# Altium schematic symbol library TitansLib.SchLib: 462 symbols (part 7 of 24)
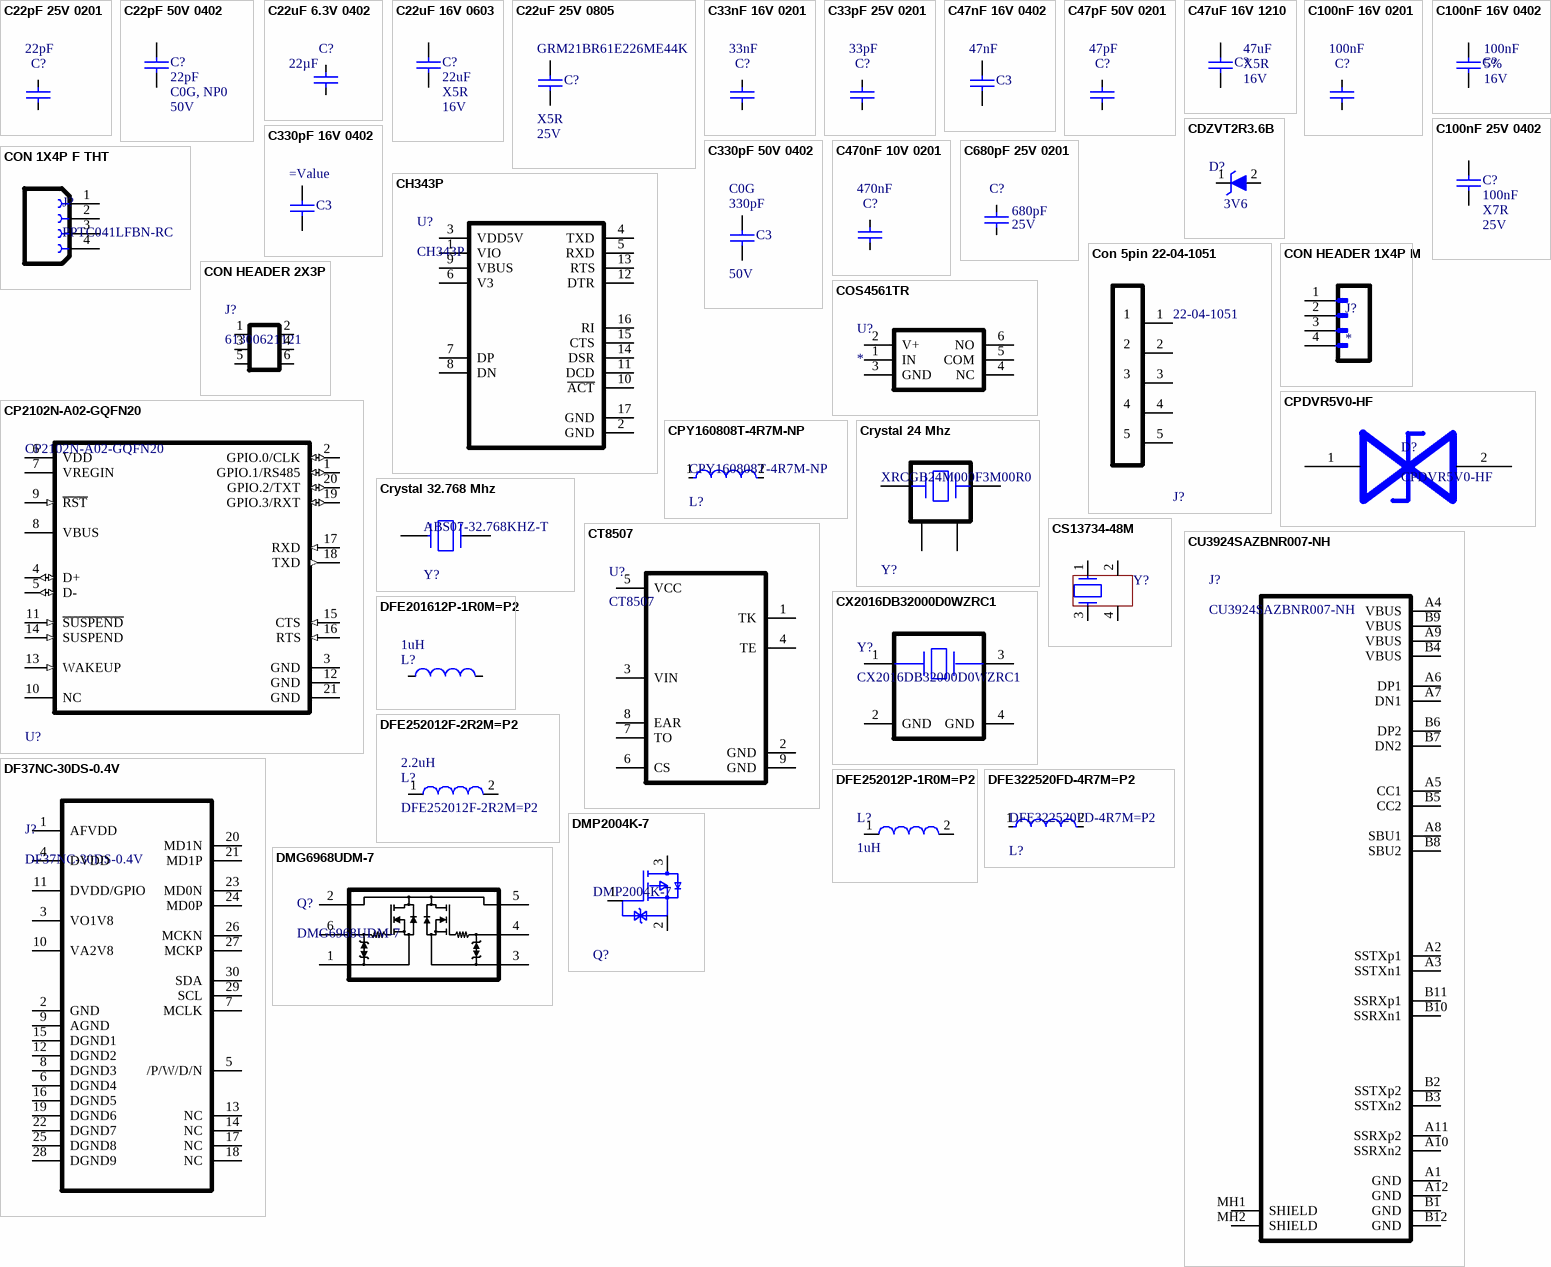
[diagram p23: symbols C22pF 25V 0201 to DMP2004K-7]

## C22pF 25V 0201
designator C?, comment value 22pF  (hidden comment: GRM0335C1E220JA01D)
25V 22pF C0G ±5% 0201 Multilayer Ceramic Capacitors MLCC - SMD/SMT ROHS; Manufacturer: Murata; Manufacturer Lifecycle Status: IN PRODUCTION; Temperature Coefficient: 30ppm/°C; Supplier: DigiKey; Supplier Part Number: 490-1253-1-ND; Manufacturer Part Number: GRM0335C1E220JA01D; RoHS: Compliant; Category: Ceramic Capacitors; Stock: 779005; Pricing: 1=0.1, 10=0.013, 50=0.0086, 100=0.0072, 500=0.00494, 1000=0.00424, 2500=0.00351, 5000=0.00308 (USD); Case/Package: 0201; Case Code (Imperial): 0201; Case Code (Metric): 0603; Country of Origin: Japan, Mainland China, Philippines, Singapore, Thailand; Depth: 300µm; Dielectric: C0G; Dielectric Material: Ceramic; Export Control Classification Number (ECCN) Code: EAR99; Height: 300µm; Harmonized Tariff Schedule (HTS) Code: 8532.24.00.20; Introduction Date: 2013-05-17; Lead Free: Lead Free; Length: 600µm; Lifecycle Status: Production; Material: Ceramic; Max Operating Temperature: 125°C; Min Operating Temperature: -55°C; Mounting Technology: Surface Mount; Number of Terminals: 2; Packaging: Cut Tape; Radiation Hardening: No; REACH SVHC: Yes; Schedule B: 8532240020, 8532240020|8532240020, 8532240020|8532240020|8532240020, 8532240020|8532240020|8532240020|8532240020; Termination: SMD/SMT; Thickness: 300µm; Tolerance: 5%; Voltage: 25V; Voltage Rating: 25V; Voltage Rating (DC): 25V; Width: 300µm; ComponentLink1URL: https://datasheet.octopart.com:443/GRM0335C1E220JA01D-Murata-datasheet-62317011.pdf?src-supplier=element14+APAC; ComponentLink1Description: https://datasheet.octopart.com:443/GRM0335C1E220JA01D-Murata-datasheet-62317011.pdf?src-supplier=element14+APAC; ComponentLink2URL: https://datasheet.octopart.com:443/GRM0335C1E220JA01D-Murata-datasheet-14397985.pdf?src-supplier=Future+Electronics; ComponentLink2Description: https://datasheet.octopart.com:443/GRM0335C1E220JA01D-Murata-datasheet-14397985.pdf?src-supplier=Future+Electronics; ComponentLink3URL: https://datasheet.octopart.com:443/GRM0335C1E220JA01D-Murata-datasheet-22122223.pdf?src-supplier=Future+Electronics; ComponentLink3Description: https://datasheet.octopart.com:443/GRM0335C1E220JA01D-Murata-datasheet-22122223.pdf?src-supplier=Future+Electronics; ComponentLink4URL: https://datasheet.octopart.com:443/GRM0335C1E220JA01D-Murata-datasheet-11802261.pdf?src-supplier=Future+Electronics; ComponentLink4Description: https://datasheet.octopart.com:443/GRM0335C1E220JA01D-Murata-datasheet-11802261.pdf?src-supplier=Future+Electronics; ComponentLink5URL: https://datasheet.octopart.com:443/GRM0335C1E220JA01D-Murata-datasheet-44105215.pdf?src-supplier=Future+Electronics; ComponentLink5Description: https://datasheet.octopart.com:443/GRM0335C1E220JA01D-Murata-datasheet-44105215.pdf?src-supplier=Future+Electronics; ComponentLink6URL: https://datasheet.octopart.com:443/GRM0335C1E220JA01D-Murata-datasheet-165579666.pdf?src-supplier=TME; ComponentLink6Description: https://datasheet.octopart.com:443/GRM0335C1E220JA01D-Murata-datasheet-165579666.pdf?src-supplier=TME; ComponentLink7URL: https://datasheet.octopart.com:443/GRM0335C1E220JA01D-Murata-datasheet-141273936.pdf?src-supplier=Ciiva; ComponentLink7Description: https://datasheet.octopart.com:443/GRM0335C1E220JA01D-Murata-datasheet-141273936.pdf?src-supplier=Ciiva; ComponentLink8URL: https://datasheet.octopart.com:443/GRM0335C1E220JA01D-Murata-datasheet-140673936.pdf?src-supplier=Ciiva; ComponentLink8Description: https://datasheet.octopart.com:443/GRM0335C1E220JA01D-Murata-datasheet-140673936.pdf?src-supplier=Ciiva; ComponentLink9URL: https://datasheet.octopart.com:443/GRM0335C1E220JA01D-Murata-datasheet-138736716.pdf?src-supplier=Ciiva; ComponentLink9Description: https://datasheet.octopart.com:443/GRM0335C1E220JA01D-Murata-datasheet-138736716.pdf?src-supplier=Ciiva; ComponentLink10URL: https://datasheet.octopart.com/GRM0335C1E220JA01D-Murata-datasheet-12515295.pdf; ComponentLink10Description: https://datasheet.octopart.com/GRM0335C1E220JA01D-Murata-datasheet-12515295.pdf; ComponentLink11URL: https://datasheet.octopart.com/GRM0335C1E220JA01D-Murata-datasheet-12510076.pdf; ComponentLink11Description: https://datasheet.octopart.com/GRM0335C1E220JA01D-Murata-datasheet-12510076.pdf; ComponentLink12URL: https://datasheet.octopart.com/GRM0335C1E220JA01D-Murata-datasheet-11978611.pdf; ComponentLink12Description: https://datasheet.octopart.com/GRM0335C1E220JA01D-Murata-datasheet-11978611.pdf; ComponentLink13URL: https://datasheet.octopart.com/GRM0335C1E220JA01D-Murata-datasheet-10025737.pdf; ComponentLink13Description: https://datasheet.octopart.com/GRM0335C1E220JA01D-Murata-datasheet-10025737.pdf; ComponentLink14URL: https://datasheet.octopart.com/GRM0335C1E220JA01D-Murata-datasheet-8819587.pdf; ComponentLink14Description: https://datasheet.octopart.com/GRM0335C1E220JA01D-Murata-datasheet-8819587.pdf; ComponentLink15URL: http://sigma.octopart.com:80/reach_statement/Murata-company-16.pdf?src-supplier=Compliance+Statements; ComponentLink15Description: http://sigma.octopart.com:80/reach_statement/Murata-company-16.pdf?src-supplier=Compliance+Statements
footprint CAPC0603X03N (Chip Capacitor, 2-Leads, Body 0.60x0.30mm, IPC Medium Density)
pins: 1, 2

## C22pF 50V 0402
designator C?, comment Temp Coef: C0G, NP0  Voltage: 50V  (hidden comment: 22pF)
22pF 50V C0G, NP0 5% 0402; Manufacturer: Yageo; Manufacturer Part Number: CC0402JRNPO9BN220; Type: Capacitor; Package: 0402 (1005 Metric); Supplier 1: Digikey; Supplier Part Number 1: 311-1018-1-ND; Supplier Link 1: https://www.digikey.com/product-detail/en/yageo/CC0402JRNPO9BN220/311-1018-1-ND/302935; Tolerance: 5%; Value: 22pF
footprint C0402_H0P7
pins: 1, 2

## C22uF 6.3V 0402
designator C?, comment value 22µF  (hidden comment: GRM158R60J226ME01D)
6.3V 22uF X5R ±20% 0402 Multilayer Ceramic Capacitors MLCC - SMD/SMT ROHS; Manufacturer: Murata; Manufacturer Lifecycle Status: IN PRODUCTION; Supplier: Future Electronics; Supplier Part Number: GRM158R60J226ME01D; Manufacturer Part Number: GRM158R60J226ME01D; RoHS: Compliant; Category: Ceramic Capacitors; Stock: 8000; Pricing: 8000=0,0746, 16000=0,0725 (USD); Case/Package: 0402; Dielectric: X5R; Dielectric Material: Ceramic; Height: 800µm; Length: 1mm; Lifecycle Status: Production; Material: Ceramic; Max Operating Temperature: 85°C; Min Operating Temperature: -55°C; Mounting Technology: Surface Mount; Number of Terminals: 2; REACH SVHC: Yes; Schedule B: 8532240020|8532240020|8532240020|8532240020|8532240020; Thickness: 800µm; Voltage Rating: 6.3V; Voltage Rating (DC): 6.3V; Width: 500µm; ComponentLink1URL: https://datasheet.octopart.com:443/GRM158R60J226ME01D-Murata-datasheet-155239073.pdf?src-supplier=Newark; ComponentLink1Description: https://datasheet.octopart.com:443/GRM158R60J226ME01D-Murata-datasheet-155239073.pdf?src-supplier=Newark; ComponentLink2URL: https://datasheet.octopart.com:443/GRM158R60J226ME01D-Murata-datasheet-165579666.pdf?src-supplier=TME; ComponentLink2Description: https://datasheet.octopart.com:443/GRM158R60J226ME01D-Murata-datasheet-165579666.pdf?src-supplier=TME; ComponentLink3URL: https://datasheet.octopart.com/GRM158R60J226ME01D-Murata-datasheet-12515295.pdf; ComponentLink3Description: https://datasheet.octopart.com/GRM158R60J226ME01D-Murata-datasheet-12515295.pdf; ComponentLink4URL: https://datasheet.octopart.com/GRM158R60J226ME01D-Murata-datasheet-12510076.pdf; ComponentLink4Description: https://datasheet.octopart.com/GRM158R60J226ME01D-Murata-datasheet-12510076.pdf; ComponentLink5URL: https://datasheet.octopart.com/GRM158R60J226ME01D-Murata-datasheet-11978611.pdf; ComponentLink5Description: https://datasheet.octopart.com/GRM158R60J226ME01D-Murata-datasheet-11978611.pdf; ComponentLink6URL: https://datasheet.octopart.com/GRM158R60J226ME01D-Murata-datasheet-10025737.pdf; ComponentLink6Description: https://datasheet.octopart.com/GRM158R60J226ME01D-Murata-datasheet-10025737.pdf; ComponentLink7URL: https://datasheet.octopart.com/GRM158R60J226ME01D-Murata-datasheet-8819587.pdf; ComponentLink7Description: https://datasheet.octopart.com/GRM158R60J226ME01D-Murata-datasheet-8819587.pdf; ComponentLink8URL: http://sigma.octopart.com:80/reach_statement/Murata-company-16.pdf?src-supplier=Compliance+Statements; ComponentLink8Description: http://sigma.octopart.com:80/reach_statement/Murata-company-16.pdf?src-supplier=Compliance+Statements; Supplier 1: DigiKey; Supplier Part Number 1: 490-GRM158R60J226ME01DCT-ND; Supplier 2: DigiKey; Supplier Part Number 2: 490-GRM158R60J226ME01DDKR-ND; Supplier 3: Mouser; Supplier Part Number 3: 81-GRM158R60J226ME1D; Tolerance: 20%
footprint CAPC1005X06N (Chip Capacitor, 2-Leads, Body 1.00x0.50mm, IPC Medium Density)
pins: 1, 2

## C22uF 16V 0603
designator C?, comment value 22uF  Temp Coef: X5R  Voltage: 16V  (hidden comment: CL10A226MO7JZNC)
22uF 16V X5R 20% 0603; Manufacturer: Samsung Electro-Mechanics; Type: Capacitor; Package: 0603; Manufacturer Part Number: CL10A226MO7JZNC; Supplier 1: DigiKey; Supplier Part Number 1: 1276-7076-6-ND; Supplier Link 1: https://www.digikey.com/en/products/detail/samsung-electro-mechanics/CL10A226MO7JZNC/7320581; Datasheet: https://mm.digikey.com/Volume0/opasdata/d220001/medias/docus/2139/CL10A226MO7JZNC_Spec.pdf; Tolerance: 20%; Packaging: Cut Tape; RoHS Compliant: Yes
footprint C0603_H0P8
pins: 1, 2

## C22uF 25V 0805
designator C?, comment GRM21BR61E226ME44K  Rated DC Voltage (URdc): 25V  Temperature Characteristics Code: X5R
22uF 25V X5R 20% 0805; Manufacturer: Murata; Dielectric Material: Ceramic; Multilayer: Yes; Supplier: Mouser; Supplier Part Number: 81-GRM21BR61E226ME4K; Manufacturer Part Number: GRM21BR61E226ME44K; RoHS: Yes; Category: Ceramic Capacitors; Stock: 19596; Pricing: 1=0.32, 10=0.198, 50=0.198, 100=0.129, 1000=0.092, 10000=0.069 (USD); Mounting Technology: Surface Mount; Pins: 2; Package Shape: Rectangular; Case/Package: 0805; Terminal Finish: Nickel; Min Operating Temperature: -55°C; Max Operating Temperature: 85°C; JESD-609 Code: e3; Value: 22uF; Capacitor Type: Ceramic; Tolerance  (fill in as +-): 20%; Package Style: SMTMeter; Packaging: Tape and Reel; Tolerance (fill in as +-): 20%; Termination: Wraparound; Length: 2mm; Width: 1.25mm; Height: 1.25mm; Reach SVHC Compliant: Yes; RoHS Compliant: Yes; ComponentLink1URL: https://datasheet.ciiva.com:443/pdfs/VipMasterIC/IC/MURE/MURE-S-A0002977178/MURE-S-A0002978778-1.pdf?src-supplier=IHS+Markit; ComponentLink1Description: https://datasheet.ciiva.com:443/pdfs/VipMasterIC/IC/MURE/MURE-S-A0002977178/MURE-S-A0002978778-1.pdf?src-supplier=IHS+Markit; ComponentLink2URL: http://www.mouser.com/ds/2/281/c02e-2905.pdf?src-supplier=Mouser; ComponentLink2Description: http://www.mouser.com/ds/2/281/c02e-2905.pdf?src-supplier=Mouser; ComponentLink3URL: https://datasheet.octopart.com/GRM21BR61E226ME44K-Murata-datasheet-155345081.pdf?src-supplier=Element14; ComponentLink3Description: https://datasheet.octopart.com/GRM21BR61E226ME44K-Murata-datasheet-155345081.pdf?src-supplier=Element14; ComponentLink4URL: http://search.murata.co.jp/Ceramy/image/img/A01X/G101/ENG/GRM21BR61E226ME44-01.pdf?src-supplier=Digikey; ComponentLink4Description: http://search.murata.co.jp/Ceramy/image/img/A01X/G101/ENG/GRM21BR61E226ME44-01.pdf?src-supplier=Digikey; ComponentLink5URL: https://search.murata.co.jp/Ceramy/image/img/A01X/G101/ENG/GRM21BR61E226ME44-01.pdf?src-supplier=Digikey; ComponentLink5Description: https://search.murata.co.jp/Ceramy/image/img/A01X/G101/ENG/GRM21BR61E226ME44-01.pdf?src-supplier=Digikey; ComponentLink6URL: https://datasheet.octopart.com/GRM21BR61E226ME44K-Murata-datasheet-99353850.pdf?src-supplier=Future+Electronics; ComponentLink6Description: https://datasheet.octopart.com/GRM21BR61E226ME44K-Murata-datasheet-99353850.pdf?src-supplier=Future+Electronics; ComponentLink7URL: https://datasheet.octopart.com/GRM21BR61E226ME44K-Murata-datasheet-155345081.pdf?src-supplier=Newark; ComponentLink7Description: https://datasheet.octopart.com/GRM21BR61E226ME44K-Murata-datasheet-155345081.pdf?src-supplier=Newark; ComponentLink8URL: https://datasheet.octopart.com/GRM21BR61E226ME44K-Murata-datasheet-165579666.pdf?src-supplier=TME; ComponentLink8Description: https://datasheet.octopart.com/GRM21BR61E226ME44K-Murata-datasheet-165579666.pdf?src-supplier=TME
footprint C0805_H1P45
pins: 1, 2

## C33nF 16V 0201
designator C?, comment value 33nF  (hidden comment: GRM033R61C333KE84D)
16V 33nF X5R ±10% 0201 Multilayer Ceramic Capacitors MLCC - SMD/SMT ROHS; Manufacturer: Murata; Manufacturer Lifecycle Status: IN PRODUCTION; Supplier: DigiKey; Supplier Part Number: 490-7226-1-ND; Manufacturer Part Number: GRM033R61C333KE84D; RoHS: Compliant; Category: Ceramic Capacitors; Stock: 288850; Pricing: 1=0.1, 10=0.042, 50=0.0286, 100=0.0246, 500=0.0178, 1000=0.01571, 2500=0.01092, 5000=0.00984 (USD); Case/Package: 0201; Case Code (Imperial): 0201; Case Code (Metric): 0603; Dielectric: X5R; Dielectric Material: Ceramic; Height: 300µm; Lead Free: Lead Free; Length: 600µm; Lifecycle Status: Production; Material: Ceramic; Max Operating Temperature: 85°C; Min Operating Temperature: -55°C; Mounting Technology: Surface Mount; Number of Terminals: 2; REACH SVHC: Yes; Schedule B: 8532240020, 8532240020|8532240020, 8532240020|8532240020|8532240020, 8532240020|8532240020|8532240020|8532240020; Termination: SMD/SMT; Thickness: 300µm; Tolerance: 10%; Voltage Rating: 16V; Voltage Rating (DC): 16V; Weight: 340.194278µg; Width: 300µm; ComponentLink1URL: https://datasheet.octopart.com:443/GRM033R61C333KE84D-Murata-datasheet-165579666.pdf?src-supplier=TME; ComponentLink1Description: https://datasheet.octopart.com:443/GRM033R61C333KE84D-Murata-datasheet-165579666.pdf?src-supplier=TME; ComponentLink2URL: https://datasheet.octopart.com:443/GRM033R61C333KE84D-Murata-datasheet-141274201.pdf?src-supplier=Ciiva; ComponentLink2Description: https://datasheet.octopart.com:443/GRM033R61C333KE84D-Murata-datasheet-141274201.pdf?src-supplier=Ciiva; ComponentLink3URL: https://datasheet.octopart.com:443/GRM033R61C333KE84D-Murata-datasheet-140676678.pdf?src-supplier=Ciiva; ComponentLink3Description: https://datasheet.octopart.com:443/GRM033R61C333KE84D-Murata-datasheet-140676678.pdf?src-supplier=Ciiva; ComponentLink4URL: https://datasheet.octopart.com:443/GRM033R61C333KE84D-Murata-datasheet-138738472.pdf?src-supplier=Ciiva; ComponentLink4Description: https://datasheet.octopart.com:443/GRM033R61C333KE84D-Murata-datasheet-138738472.pdf?src-supplier=Ciiva; ComponentLink5URL: https://datasheet.octopart.com:443/GRM033R61C333KE84D-Murata-datasheet-82944611.pdf?src-supplier=Future+Electronics; ComponentLink5Description: https://datasheet.octopart.com:443/GRM033R61C333KE84D-Murata-datasheet-82944611.pdf?src-supplier=Future+Electronics; ComponentLink6URL: https://datasheet.octopart.com:443/GRM033R61C333KE84D-Murata-datasheet-32479577.pdf?src-supplier=HQonline; ComponentLink6Description: https://datasheet.octopart.com:443/GRM033R61C333KE84D-Murata-datasheet-32479577.pdf?src-supplier=HQonline; ComponentLink7URL: https://datasheet.octopart.com/GRM033R61C333KE84D-Murata-datasheet-12515295.pdf; ComponentLink7Description: https://datasheet.octopart.com/GRM033R61C333KE84D-Murata-datasheet-12515295.pdf; ComponentLink8URL: https://datasheet.octopart.com/GRM033R61C333KE84D-Murata-datasheet-12510076.pdf; ComponentLink8Description: https://datasheet.octopart.com/GRM033R61C333KE84D-Murata-datasheet-12510076.pdf; ComponentLink9URL: https://datasheet.octopart.com/GRM033R61C333KE84D-Murata-datasheet-11978611.pdf; ComponentLink9Description: https://datasheet.octopart.com/GRM033R61C333KE84D-Murata-datasheet-11978611.pdf; ComponentLink10URL: https://datasheet.octopart.com/GRM033R61C333KE84D-Murata-datasheet-10025737.pdf; ComponentLink10Description: https://datasheet.octopart.com/GRM033R61C333KE84D-Murata-datasheet-10025737.pdf; ComponentLink11URL: https://datasheet.octopart.com/GRM033R61C333KE84D-Murata-datasheet-8819587.pdf; ComponentLink11Description: https://datasheet.octopart.com/GRM033R61C333KE84D-Murata-datasheet-8819587.pdf; ComponentLink12URL: https://datasheet.octopart.com/GRM033R61C333KE84D-Murata-datasheet-17503206.pdf; ComponentLink12Description: https://datasheet.octopart.com/GRM033R61C333KE84D-Murata-datasheet-17503206.pdf; ComponentLink13URL: https://datasheet.octopart.com:443/GRM033R61C333KE84D-Murata-datasheet-150009113.pdf?src-supplier=Arrow.cn; ComponentLink13Description: https://datasheet.octopart.com:443/GRM033R61C333KE84D-Murata-datasheet-150009113.pdf?src-supplier=Arrow.cn; ComponentLink14URL: http://sigma.octopart.com:80/reach_statement/Murata-company-16.pdf?src-supplier=Compliance+Statements; ComponentLink14Description: http://sigma.octopart.com:80/reach_statement/Murata-company-16.pdf?src-supplier=Compliance+Statements; Supplier 1: DigiKey; Supplier Part Number 1: 490-7226-1-ND; Supplier 2: DigiKey; Supplier Part Number 2: 490-7226-2-ND; Supplier 3: Mouser; Supplier Part Number 3: 81-GRM033R61C333KE4D
footprint CAPC0603X03N (Chip Capacitor, 2-Leads, Body 0.60x0.30mm, IPC Medium Density)
pins: 1, 2

## C33pF 25V 0201
designator C?, comment value 33pF  (hidden comment: GRM0335C1E330JA01D)
0201 33 pF 25 V ±5% Tolerance C0G SMT Multilayer Ceramic Capacitor; Manufacturer: Murata; Manufacturer Lifecycle Status: IN PRODUCTION; Temperature Coefficient: 30ppm/°C; Voltage Rating: 25V; Supplier: DigiKey; Supplier Part Number: 490-10678-1-ND; Manufacturer Part Number: GRM0335C1E330JA01D; RoHS: Compliant; Category: Ceramic Capacitors; Stock: 121944; Pricing: 1=0.1, 10=0.013, 50=0.0086, 100=0.0072, 500=0.00494, 1000=0.00424, 2500=0.00351, 5000=0.00308 (USD); Case/Package: 0201; Case Code (Imperial): 0201; Case Code (Metric): 0603; Depth: 300µm; Dielectric: C0G; Dielectric Material: Ceramic; Height: 300µm; Lead Free: Lead Free; Length: 600µm; Lifecycle Status: Production; Material: Ceramic; Max Operating Temperature: 125°C; Min Operating Temperature: -55°C; Mounting Technology: Surface Mount; Number of Terminals: 2; Packaging: Cut Tape; REACH SVHC: Yes; Schedule B: 8532240020, 8532240020|8532240020, 8532240020|8532240020|8532240020, 8532240020|8532240020|8532240020|8532240020; Termination: SMD/SMT; Thickness: 300µm; Tolerance: 5%; Voltage Rating (DC): 25V; Width: 300µm; ComponentLink1URL: https://datasheet.octopart.com:443/GRM0335C1E330JA01D-Murata-datasheet-62317015.pdf?src-supplier=element14+APAC; ComponentLink1Description: https://datasheet.octopart.com:443/GRM0335C1E330JA01D-Murata-datasheet-62317015.pdf?src-supplier=element14+APAC; ComponentLink2URL: https://datasheet.octopart.com:443/GRM0335C1E330JA01D-Murata-datasheet-141273962.pdf?src-supplier=Geoflip; ComponentLink2Description: https://datasheet.octopart.com:443/GRM0335C1E330JA01D-Murata-datasheet-141273962.pdf?src-supplier=Geoflip; ComponentLink3URL: https://datasheet.octopart.com:443/GRM0335C1E330JA01D-Murata-datasheet-165579666.pdf?src-supplier=TME; ComponentLink3Description: https://datasheet.octopart.com:443/GRM0335C1E330JA01D-Murata-datasheet-165579666.pdf?src-supplier=TME; ComponentLink4URL: https://datasheet.octopart.com:443/GRM0335C1E330JA01D-Murata-datasheet-140673980.pdf?src-supplier=Ciiva; ComponentLink4Description: https://datasheet.octopart.com:443/GRM0335C1E330JA01D-Murata-datasheet-140673980.pdf?src-supplier=Ciiva; ComponentLink5URL: https://datasheet.octopart.com:443/GRM0335C1E330JA01D-Murata-datasheet-138736760.pdf?src-supplier=Ciiva; ComponentLink5Description: https://datasheet.octopart.com:443/GRM0335C1E330JA01D-Murata-datasheet-138736760.pdf?src-supplier=Ciiva; ComponentLink6URL: https://datasheet.octopart.com:443/GRM0335C1E330JA01D-Murata-datasheet-22122223.pdf?src-supplier=Future+Electronics; ComponentLink6Description: https://datasheet.octopart.com:443/GRM0335C1E330JA01D-Murata-datasheet-22122223.pdf?src-supplier=Future+Electronics; ComponentLink7URL: https://datasheet.octopart.com:443/GRM0335C1E330JA01D-Murata-datasheet-12522994.pdf?src-supplier=Future+Electronics; ComponentLink7Description: https://datasheet.octopart.com:443/GRM0335C1E330JA01D-Murata-datasheet-12522994.pdf?src-supplier=Future+Electronics; ComponentLink8URL: https://datasheet.octopart.com/GRM0335C1E330JA01D-Murata-datasheet-12515295.pdf; ComponentLink8Description: https://datasheet.octopart.com/GRM0335C1E330JA01D-Murata-datasheet-12515295.pdf; ComponentLink9URL: https://datasheet.octopart.com/GRM0335C1E330JA01D-Murata-datasheet-12510076.pdf; ComponentLink9Description: https://datasheet.octopart.com/GRM0335C1E330JA01D-Murata-datasheet-12510076.pdf; ComponentLink10URL: https://datasheet.octopart.com/GRM0335C1E330JA01D-Murata-datasheet-11978611.pdf; ComponentLink10Description: https://datasheet.octopart.com/GRM0335C1E330JA01D-Murata-datasheet-11978611.pdf; ComponentLink11URL: https://datasheet.octopart.com/GRM0335C1E330JA01D-Murata-datasheet-10025737.pdf; ComponentLink11Description: https://datasheet.octopart.com/GRM0335C1E330JA01D-Murata-datasheet-10025737.pdf; ComponentLink12URL: https://datasheet.octopart.com/GRM0335C1E330JA01D-Murata-datasheet-8819587.pdf; ComponentLink12Description: https://datasheet.octopart.com/GRM0335C1E330JA01D-Murata-datasheet-8819587.pdf; ComponentLink13URL: https://datasheet.octopart.com/GRM0335C1E330JA01D-Murata-datasheet-14398025.pdf; ComponentLink13Description: https://datasheet.octopart.com/GRM0335C1E330JA01D-Murata-datasheet-14398025.pdf; ComponentLink14URL: http://sigma.octopart.com:80/reach_statement/Murata-company-16.pdf?src-supplier=Compliance+Statements; ComponentLink14Description: http://sigma.octopart.com:80/reach_statement/Murata-company-16.pdf?src-supplier=Compliance+Statements
footprint CAPC0603X03N (Chip Capacitor, 2-Leads, Body 0.60x0.30mm, IPC Medium Density)
pins: 1, 2

## C47nF 16V 0402
designator C3, comment 47nF
C47nF 16V X7R 10% 0402; Manufacturer: Murata; Manufacturer Part Number: GRM155R71C473KA01J; Dielectric Material: Ceramic; Multilayer: Yes; Supplier: Mouser; Supplier Part Number: 81-GRM155R71C473KA1J; RoHS: Yes; Category: Ceramic Capacitors; Stock: 129415; Pricing: 1=0.1, 10=0.013, 50=0.013, 100=0.008, 1000=0.007, 10000=0.005 (USD); Mounting Technology: Surface Mount; Pins: 2; Package Shape: Rectangular; Case/Package: 0402; Terminal Finish: Nickel; Min Operating Temperature: -55°C; Max Operating Temperature: 125°C; JESD-609 Code: e3; Value: 47nF; Capacitor Type: Ceramic; Tolerance  (fill in as +-): 10%; Package Style: SMTMeter; Packaging: Tape and Reel; Tolerance (fill in as +-): 10%; Rated DC Voltage (URdc): 16V; Temperature Characteristics Code: X7R; Termination: Wraparound; Length: 1mm; Width: 0.5mm; Height: 0.5mm; Reach SVHC Compliant: Yes; RoHS Compliant: Yes; ComponentLink1URL: https://datasheet.ciiva.com:443/pdfs/VipMasterIC/IC/MURE/MURE-S-A0004362469/MURE-S-A0004364662-1.pdf?src-supplier=IHS+Markit; ComponentLink1Description: https://datasheet.ciiva.com:443/pdfs/VipMasterIC/IC/MURE/MURE-S-A0004362469/MURE-S-A0004364662-1.pdf?src-supplier=IHS+Markit; ComponentLink2URL: https://datasheet.ciiva.com/163/partnumbering-e-01-163786.pdf?src-supplier=Digikey; ComponentLink2Description: https://datasheet.ciiva.com/163/partnumbering-e-01-163786.pdf?src-supplier=Digikey; ComponentLink3URL: https://datasheet.ciiva.com/11608/product-11608168.pdf?src-supplier=Avnet; ComponentLink3Description: https://datasheet.ciiva.com/11608/product-11608168.pdf?src-supplier=Avnet
footprint C0402_H0P7
pins: 1, 2

## C47pF 50V 0201
designator C?, comment value 47pF  (hidden comment: GRM0335C1H470GA01D)
50V 47pF C0G ±2% 0201 Multilayer Ceramic Capacitors MLCC - SMD/SMT ROHS; Manufacturer: Murata; Manufacturer Lifecycle Status: IN PRODUCTION; Temperature Coefficient: 30ppm/°C; Supplier: DigiKey; Supplier Part Number: 490-14562-1-ND; Manufacturer Part Number: GRM0335C1H470GA01D; RoHS: Compliant; Category: Ceramic Capacitors; Stock: 75091; Pricing: 1=0.1, 10=0.015, 50=0.0096, 100=0.008, 500=0.00552, 1000=0.00475, 2500=0.00395, 5000=0.00346 (USD); Case/Package: 0201; Case Code (Imperial): 0201; Case Code (Metric): 0603; Dielectric: C0G; Dielectric Material: Ceramic; Export Control Classification Number (ECCN) Code: EAR99; Height: 300µm; Harmonized Tariff Schedule (HTS) Code: 8532.24.00.20; Introduction Date: 2013-01-29; Length: 600µm; Lifecycle Status: Production; Material: Ceramic; Max Operating Temperature: 125°C; Min Operating Temperature: -55°C; Mounting Technology: Surface Mount; Number of Terminals: 2; REACH SVHC: Yes; Schedule B: 8532240020, 8532240020|8532240020, 8532240020|8532240020|8532240020, 8532240020|8532240020|8532240020|8532240020; Termination: SMD/SMT; Thickness: 300µm; Tolerance: 2%; Voltage Rating: 50V; Voltage Rating (DC): 50V; Width: 300µm; ComponentLink1URL: https://datasheet.octopart.com:443/GRM0335C1H470GA01D-Murata-datasheet-141274027.pdf?src-supplier=Geoflip; ComponentLink1Description: https://datasheet.octopart.com:443/GRM0335C1H470GA01D-Murata-datasheet-141274027.pdf?src-supplier=Geoflip; ComponentLink2URL: https://datasheet.octopart.com:443/GRM0335C1H470GA01D-Murata-datasheet-165579666.pdf?src-supplier=TME; ComponentLink2Description: https://datasheet.octopart.com:443/GRM0335C1H470GA01D-Murata-datasheet-165579666.pdf?src-supplier=TME; ComponentLink3URL: https://datasheet.octopart.com:443/GRM0335C1H470GA01D-Murata-datasheet-140674453.pdf?src-supplier=Ciiva; ComponentLink3Description: https://datasheet.octopart.com:443/GRM0335C1H470GA01D-Murata-datasheet-140674453.pdf?src-supplier=Ciiva; ComponentLink4URL: https://datasheet.octopart.com:443/GRM0335C1H470GA01D-Murata-datasheet-138737241.pdf?src-supplier=Ciiva; ComponentLink4Description: https://datasheet.octopart.com:443/GRM0335C1H470GA01D-Murata-datasheet-138737241.pdf?src-supplier=Ciiva; ComponentLink5URL: https://datasheet.octopart.com:443/GRM0335C1H470GA01D-Murata-datasheet-102370999.pdf?src-supplier=HQonline; ComponentLink5Description: https://datasheet.octopart.com:443/GRM0335C1H470GA01D-Murata-datasheet-102370999.pdf?src-supplier=HQonline; ComponentLink6URL: https://datasheet.octopart.com/GRM0335C1H470GA01D-Murata-datasheet-12515295.pdf; ComponentLink6Description: https://datasheet.octopart.com/GRM0335C1H470GA01D-Murata-datasheet-12515295.pdf; ComponentLink7URL: https://datasheet.octopart.com/GRM0335C1H470GA01D-Murata-datasheet-12510076.pdf; ComponentLink7Description: https://datasheet.octopart.com/GRM0335C1H470GA01D-Murata-datasheet-12510076.pdf; ComponentLink8URL: https://datasheet.octopart.com/GRM0335C1H470GA01D-Murata-datasheet-11978611.pdf; ComponentLink8Description: https://datasheet.octopart.com/GRM0335C1H470GA01D-Murata-datasheet-11978611.pdf; ComponentLink9URL: https://datasheet.octopart.com/GRM0335C1H470GA01D-Murata-datasheet-10025737.pdf; ComponentLink9Description: https://datasheet.octopart.com/GRM0335C1H470GA01D-Murata-datasheet-10025737.pdf; ComponentLink10URL: https://datasheet.octopart.com/GRM0335C1H470GA01D-Murata-datasheet-8819587.pdf; ComponentLink10Description: https://datasheet.octopart.com/GRM0335C1H470GA01D-Murata-datasheet-8819587.pdf; ComponentLink11URL: https://datasheet.octopart.com/GRM0335C1H470GA01D-Murata-datasheet-14395961.pdf; ComponentLink11Description: https://datasheet.octopart.com/GRM0335C1H470GA01D-Murata-datasheet-14395961.pdf; ComponentLink12URL: http://sigma.octopart.com:80/reach_statement/Murata-company-16.pdf?src-supplier=Compliance+Statements; ComponentLink12Description: http://sigma.octopart.com:80/reach_statement/Murata-company-16.pdf?src-supplier=Compliance+Statements
footprint CAPC0603X03N (Chip Capacitor, 2-Leads, Body 0.60x0.30mm, IPC Medium Density)
pins: 1, 2

## C47uF 16V 1210
designator C?, comment value 47uF  Voltage Rating: 16V  Dielectric: X5R  (hidden comment: CL32A476MOJNNNE)
Ceramic Capacitor, Multilayer, Ceramic, 16V, 20% +Tol, 20% -Tol, X5R, +-15% TC, 47uF, Surface Mount, 1210 inch; Manufacturer: Samsung Electro-Mechanics; Supplier 1: DigiKey; Supplier Part Number 1: 1276-CL32A476MOJNNNECT-ND; Supplier 2: DigiKey; Supplier Part Number 2: 1276-CL32A476MOJNNNEDKR-ND; Supplier 3: Mouser; Supplier Part Number 3: 187-CL32A476MOJNNNE; Supplier: DigiKey; Supplier Part Number: 1276-CL32A476MOJNNNEDKR-ND; Manufacturer Part Number: CL32A476MOJNNNE; RoHS: Compliant; Category: Ceramic Capacitors; Stock: 17095; Pricing: 1=0.63, 10=0.389, 50=0.295, 100=0.2662, 500=0.21746 (USD); Case/Package: 1210; China RoHS: Compliant; Dielectric Material: Ceramic; Height: 2.5mm; Length: 3.2mm; Lifecycle Status: Production; Material: Ceramic; Max Operating Temperature: 85°C; Min Operating Temperature: -55°C; Mounting Technology: Surface Mount; Number of Terminals: 2; REACH SVHC: Yes; Schedule B: 8532240020, 8532240020|8532240020|8532240020|8532240020|8532240020; Tolerance: 20%; Voltage Rating (DC): 16V; Width: 2.5mm; ComponentLink1URL: https://datasheet.octopart.com:443/CL32A476MOJNNNE-Samsung-Electro-Mechanics-datasheet-182024803.pdf?src-supplier=IHS; ComponentLink1Description: https://datasheet.octopart.com:443/CL32A476MOJNNNE-Samsung-Electro-Mechanics-datasheet-182024803.pdf?src-supplier=IHS; ComponentLink2URL: https://datasheet.octopart.com/CL32A476MOJNNNE-Samsung-Electro-Mechanics-datasheet-8324245.pdf; ComponentLink2Description: https://datasheet.octopart.com/CL32A476MOJNNNE-Samsung-Electro-Mechanics-datasheet-8324245.pdf; ComponentLink3URL: https://datasheet.octopart.com/CL32A476MOJNNNE-Samsung-Electro-Mechanics-datasheet-97040617.pdf; ComponentLink3Description: https://datasheet.octopart.com/CL32A476MOJNNNE-Samsung-Electro-Mechanics-datasheet-97040617.pdf; ComponentLink4URL: https://datasheet.octopart.com:443/CL32A476MOJNNNE-Samsung-Electro-Mechanics-datasheet-141348257.pdf?src-supplier=Samsung+SCT; ComponentLink4Description: https://datasheet.octopart.com:443/CL32A476MOJNNNE-Samsung-Electro-Mechanics-datasheet-141348257.pdf?src-supplier=Samsung+SCT
footprint C1210 (Chip Capacitor, 2-Leads, Body 3.20x2.50mm, IPC Medium Density)
pins: 1, 2

## C100nF 16V 0201
designator C?, comment value 100nF  (hidden comment: GRM033Z71C104KE14D)
16V 100nF X7R ±10% 0201 Multilayer Ceramic Capacitors MLCC - SMD/SMT ROHS; Manufacturer: Murata; Manufacturer Lifecycle Status: IN PRODUCTION; Supplier: DigiKey; Supplier Part Number: 490-GRM033Z71C104KE14DCT-ND; Manufacturer Part Number: GRM033Z71C104KE14D; RoHS: Compliant; Category: Ceramic Capacitors; Stock: 3354361; Pricing: 1=0.08, 10=0.012, 50=0.0112, 100=0.0104, 500=0.0072, 1000=0.0064, 2500=0.0056, 5000=0.0048 (USD); Case/Package: 0201; Dielectric Material: Ceramic; Height: 300µm; Length: 600µm; Lifecycle Status: Production; Material: Ceramic; Max Operating Temperature: 125°C; Min Operating Temperature: -55°C; Mounting Technology: Surface Mount; Number of Terminals: 2; REACH SVHC: Yes; Thickness: 300µm; Tolerance: 10%; Voltage Rating: 16V; Voltage Rating (DC): 16V; Width: 300µm; ComponentLink1URL: https://datasheet.octopart.com:443/GRM033Z71C104KE14D-Murata-datasheet-165579666.pdf?src-supplier=TME; ComponentLink1Description: https://datasheet.octopart.com:443/GRM033Z71C104KE14D-Murata-datasheet-165579666.pdf?src-supplier=TME; ComponentLink2URL: https://datasheet.octopart.com:443/GRM033Z71C104KE14D-Murata-datasheet-140678597.pdf?src-supplier=Ciiva; ComponentLink2Description: https://datasheet.octopart.com:443/GRM033Z71C104KE14D-Murata-datasheet-140678597.pdf?src-supplier=Ciiva; ComponentLink3URL: https://datasheet.octopart.com:443/GRM033Z71C104KE14D-Murata-datasheet-140677062.pdf?src-supplier=Ciiva; ComponentLink3Description: https://datasheet.octopart.com:443/GRM033Z71C104KE14D-Murata-datasheet-140677062.pdf?src-supplier=Ciiva; ComponentLink4URL: https://datasheet.octopart.com:443/GRM033Z71C104KE14D-Murata-datasheet-138738747.pdf?src-supplier=Ciiva; ComponentLink4Description: https://datasheet.octopart.com:443/GRM033Z71C104KE14D-Murata-datasheet-138738747.pdf?src-supplier=Ciiva; ComponentLink5URL: http://sigma.octopart.com:80/reach_statement/Murata-company-16.pdf?src-supplier=Compliance+Statements; ComponentLink5Description: http://sigma.octopart.com:80/reach_statement/Murata-company-16.pdf?src-supplier=Compliance+Statements; Supplier 1: DigiKey; Supplier Part Number 1: 490-GRM033Z71C104KE14DCT-ND; Supplier 2: DigiKey; Supplier Part Number 2: 490-GRM033Z71C104KE14DTR-ND; Supplier 3: Mouser; Supplier Part Number 3: 81-GRM033Z71C104KE4D
footprint CAPC0603X03N (Chip Capacitor, 2-Leads, Body 0.60x0.30mm, IPC Medium Density)
pins: 1, 2

## C100nF 16V 0402
designator C?, comment value 100nF  Voltage: 16V  Tolerance: 5%  (hidden comment: GRM155R71C104JA88D)
16V 100nF X7R ±5% 0402 Multilayer Ceramic Capacitors MLCC - SMD/SMT ROHS; Manufacturer: Murata; Manufacturer Lifecycle Status: NRND; Supplier: Avnet; Supplier Part Number: GRM155R71C104JA88D; Manufacturer Part Number: GRM155R71C104JA88D; RoHS: Compliant; Category: Ceramic Capacitors; Stock: 40000; Pricing: 10000=0,00481, 20000=0,00468, 40000=0,00463, 80000=0,00451, 160000=0,00441 (USD); Case/Package: 0402; Case Code (Imperial): 0402; Case Code (Metric): 1005; Country of Origin: Philippines; Depth: 500µm; Dielectric: X7R; Dielectric Material: Ceramic; Export Control Classification Number (ECCN) Code: EAR99; Height: 500µm; Harmonized Tariff Schedule (HTS) Code: 8532.24.00.20; Introduction Date: 2013-11-20; Lead Free: Lead Free; Length: 1mm; Lifecycle Status: NRND; Material: Ceramic; Max Operating Temperature: 125°C; Min Operating Temperature: -55°C; Mounting Technology: Surface Mount; Number of Terminals: 2; Packaging: Cut Tape; Radiation Hardening: No; REACH SVHC: Yes; Schedule B: 8532240020, 8532240020|8532240020, 8532240020|8532240020|8532240020, 8532240020|8532240020|8532240020|8532240020; Termination: SMD/SMT; Thickness: 500µm; Voltage Rating: 16V; Voltage Rating (DC): 16V; Width: 500µm; ComponentLink1URL: https://datasheet.octopart.com/GRM155R71C104JA88D-Murata-datasheet-8819587.pdf; ComponentLink1Description: https://datasheet.octopart.com/GRM155R71C104JA88D-Murata-datasheet-8819587.pdf; ComponentLink2URL: https://datasheet.octopart.com/GRM155R71C104JA88D-Murata-datasheet-12515295.pdf; ComponentLink2Description: https://datasheet.octopart.com/GRM155R71C104JA88D-Murata-datasheet-12515295.pdf; ComponentLink3URL: https://datasheet.octopart.com/GRM155R71C104JA88D-Murata-datasheet-12510076.pdf; ComponentLink3Description: https://datasheet.octopart.com/GRM155R71C104JA88D-Murata-datasheet-12510076.pdf; ComponentLink4URL: https://datasheet.octopart.com/GRM155R71C104JA88D-Murata-datasheet-11978611.pdf; ComponentLink4Description: https://datasheet.octopart.com/GRM155R71C104JA88D-Murata-datasheet-11978611.pdf; ComponentLink5URL: https://datasheet.octopart.com/GRM155R71C104JA88D-Murata-datasheet-10025737.pdf; ComponentLink5Description: https://datasheet.octopart.com/GRM155R71C104JA88D-Murata-datasheet-10025737.pdf; ComponentLink6URL: https://datasheet.octopart.com/GRM155R71C104JA88D-Murata-datasheet-14400566.pdf; ComponentLink6Description: https://datasheet.octopart.com/GRM155R71C104JA88D-Murata-datasheet-14400566.pdf; ComponentLink7URL: https://datasheet.octopart.com:443/GRM155R71C104JA88D-Murata-datasheet-39128483.pdf?src-supplier=Newark; ComponentLink7Description: https://datasheet.octopart.com:443/GRM155R71C104JA88D-Murata-datasheet-39128483.pdf?src-supplier=Newark; ComponentLink8URL: https://datasheet.octopart.com:443/GRM155R71C104JA88D-Murata-datasheet-62317117.pdf?src-supplier=element14+APAC; ComponentLink8Description: https://datasheet.octopart.com:443/GRM155R71C104JA88D-Murata-datasheet-62317117.pdf?src-supplier=element14+APAC; ComponentLink9URL: https://datasheet.octopart.com:443/GRM155R71C104JA88D-Murata-datasheet-165579666.pdf?src-supplier=TME; ComponentLink9Description: https://datasheet.octopart.com:443/GRM155R71C104JA88D-Murata-datasheet-165579666.pdf?src-supplier=TME; ComponentLink10URL: https://datasheet.octopart.com:443/GRM155R71C104JA88D-Murata-datasheet-141266224.pdf?src-supplier=Ciiva; ComponentLink10Description: https://datasheet.octopart.com:443/GRM155R71C104JA88D-Murata-datasheet-141266224.pdf?src-supplier=Ciiva; ComponentLink11URL: https://datasheet.octopart.com:443/GRM155R71C104JA88D-Murata-datasheet-140690971.pdf?src-supplier=Ciiva; ComponentLink11Description: https://datasheet.octopart.com:443/GRM155R71C104JA88D-Murata-datasheet-140690971.pdf?src-supplier=Ciiva; ComponentLink12URL: https://datasheet.octopart.com:443/GRM155R71C104JA88D-Murata-datasheet-138740889.pdf?src-supplier=Ciiva; ComponentLink12Description: https://datasheet.octopart.com:443/GRM155R71C104JA88D-Murata-datasheet-138740889.pdf?src-supplier=Ciiva; ComponentLink13URL: https://datasheet.octopart.com:443/GRM155R71C104JA88D-Murata-datasheet-22122223.pdf?src-supplier=Future+Electronics; ComponentLink13Description: https://datasheet.octopart.com:443/GRM155R71C104JA88D-Murata-datasheet-22122223.pdf?src-supplier=Future+Electronics; ComponentLink14URL: https://datasheet.octopart.com:443/GRM155R71C104JA88D-Murata-datasheet-8324214.pdf?src-supplier=Future+Electronics; ComponentLink14Description: https://datasheet.octopart.com:443/GRM155R71C104JA88D-Murata-datasheet-8324214.pdf?src-supplier=Future+Electronics; ComponentLink15URL: http://sigma.octopart.com:80/reach_statement/Murata-company-16.pdf?src-supplier=Compliance+Statements; ComponentLink15Description: http://sigma.octopart.com:80/reach_statement/Murata-company-16.pdf?src-supplier=Compliance+Statements
footprint C0402_H0P7
pins: 1, 2

## C100nF 25V 0402
designator C?, comment value 100nF  Temp Coef: X7R  Voltage: 25V  (hidden comment: GRM155R71E104KE14J)
100nF 25V X7R 10% 0402; Manufacturer: Murata Electronics; Type: Capacitor; Package: 0402 (1005 Metric); Manufacturer Part Number: GRM155R71E104KE14J; Supplier 1: Digikey; Supplier Part Number 1: 490-14603-1-ND; Supplier Link 1: https://www.digikey.fr/product-detail/en/murata-electronics/GRM155R71E104KE14J/490-14603-1-ND/6606209; Datasheet: https://search.murata.co.jp/Ceramy/image/img/A01X/G101/ENG/GRM155R71E104KE14-01.pdf; Tolerance: 10%; RoHS Compliant: Yes
footprint C0402_H0P7
pins: 1, 2

## C330pF 16V 0402
designator C3
C330pF 16V X5R 5% 0402; Manufacturer: TDK; Manufacturer Part Number: C1005C0G2A331J050BE; Supplier: Digikey; Supplier Part Number: 445-180263-1-ND; RoHS: Yes; Category: Ceramic Capacitors; Stock: 33965; Pricing: 1=0.16, 10=0.09, 100=0.0544, 1000=0.03577, 2500=0.03108, 5000=0.02825 (USD); ComponentLink1URL: https://datasheet.ciiva.com:443/pdfs/VipMasterIC/IC/TDKC/TDKC-S-A0007785269/TDKC-S-A0007785269-1.pdf?src-supplier=IHS+Markit; ComponentLink1Description: https://datasheet.ciiva.com:443/pdfs/VipMasterIC/IC/TDKC/TDKC-S-A0007785269/TDKC-S-A0007785269-1.pdf?src-supplier=IHS+Markit; ComponentLink2URL: https://product.tdk.com/info/en/catalog/datasheets/mlcc_commercial_soft_en.pdf?src-supplier=Digikey; ComponentLink2Description: https://product.tdk.com/info/en/catalog/datasheets/mlcc_commercial_soft_en.pdf?src-supplier=Digikey; ComponentLink3URL: https://product.tdk.com/info/en/catalog/datasheets/mlcc_commercial_soft_en.pdf?ref_disty=digikey&src-supplier=Digikey; ComponentLink3Description: https://product.tdk.com/info/en/catalog/datasheets/mlcc_commercial_soft_en.pdf?ref_disty=digikey&src-supplier=Digikey; ComponentLink4URL: https://datasheet.octopart.com/C1005C0G2A331J050BE-TDK-datasheet-151546525.pdf?src-supplier=Future+Electronics; ComponentLink4Description: https://datasheet.octopart.com/C1005C0G2A331J050BE-TDK-datasheet-151546525.pdf?src-supplier=Future+Electronics
footprint C0402_H0P7
pins: 1, 2

## C330pF 50V 0402
designator C3, comment 330pF  Rated DC Voltage (URdc): 50V  Temperature Characteristics Code: C0G
C330pF 50V C0G 5% 0402; Manufacturer: Murata; Manufacturer Part Number: GRM1555C1H331JA01D; Dielectric Material: Ceramic; Multilayer: Yes; Supplier: Mouser; Supplier Part Number: 81-GRM155C1H331JA01D; RoHS: Yes; Category: Ceramic Capacitors; Stock: 237726; Pricing: 1=0.1, 10=0.036, 50=0.036, 100=0.021, 1000=0.013, 10000=0.005 (USD); Mounting Technology: Surface Mount; Pins: 2; Package Shape: Rectangular; Case/Package: 0402; Terminal Finish: Nickel; Min Operating Temperature: -55°C; Max Operating Temperature: 125°C; JESD-609 Code: e3; Value: 330pF; Capacitor Type: Ceramic; Tolerance  (fill in as +-): 5%; Package Style: SMTMeter; Packaging: Tape and Reel; Tolerance (fill in as +-): 5%; Termination: Wraparound; Length: 1mm; Width: 0.5mm; Height: 0.5mm; Reach SVHC Compliant: Yes; RoHS Compliant: Yes; ComponentLink1URL: https://datasheet.ciiva.com:443/pdfs/VipMasterIC/IC/MURE/MURE-S-A0008911154/MURE-S-A0008911260-1.pdf?src-supplier=IHS+Markit; ComponentLink1Description: https://datasheet.ciiva.com:443/pdfs/VipMasterIC/IC/MURE/MURE-S-A0008911154/MURE-S-A0008911260-1.pdf?src-supplier=IHS+Markit; ComponentLink2URL: https://datasheet.ciiva.com/11787/0900766b807a1cab-11787392.pdf?src-supplier=Rs; ComponentLink2Description: https://datasheet.ciiva.com/11787/0900766b807a1cab-11787392.pdf?src-supplier=Rs; ComponentLink3URL: https://datasheet.ciiva.com/132/product-132208.pdf?src-supplier=Digikey; ComponentLink3Description: https://datasheet.ciiva.com/132/product-132208.pdf?src-supplier=Digikey; ComponentLink4URL: https://datasheet.ciiva.com/14116/grmseries-tc-hitype-eng-14116871.pdf?src-supplier=Distrelec; ComponentLink4Description: https://datasheet.ciiva.com/14116/grmseries-tc-hitype-eng-14116871.pdf?src-supplier=Distrelec; ComponentLink5URL: https://datasheet.ciiva.com/7828/4360-7828860.pdf?src-supplier=Element14; ComponentLink5Description: https://datasheet.ciiva.com/7828/4360-7828860.pdf?src-supplier=Element14; ComponentLink6URL: https://datasheet.ciiva.com/7828/4360-7828861.pdf?src-supplier=Element14; ComponentLink6Description: https://datasheet.ciiva.com/7828/4360-7828861.pdf?src-supplier=Element14; ComponentLink7URL: https://datasheet.ciiva.com/132/partnumbering-e-01-132206.pdf?src-supplier=Digikey; ComponentLink7Description: https://datasheet.ciiva.com/132/partnumbering-e-01-132206.pdf?src-supplier=Digikey; ComponentLink8URL: https://datasheet.ciiva.com/132/partnumbering-e-01-132207.pdf?src-supplier=Digikey; ComponentLink8Description: https://datasheet.ciiva.com/132/partnumbering-e-01-132207.pdf?src-supplier=Digikey
footprint C0402_H0P7
pins: 1, 2

## C470nF 10V 0201
designator C?, comment value 470nF  (hidden comment: LMK063BBJ474KPLF)
Multilayer Ceramic Capacitors (High dielectric type), 10V, 0.47 uF, ± 10 %, 0201, X5R, RoHS; Manufacturer: TAIYO YUDEN; Tolerance: 10%; Supplier: DigiKey; Supplier Part Number: 587-6387-1-ND; Manufacturer Part Number: LMK063BBJ474KPLF; RoHS: Compliant; Category: Ceramic Capacitors; Stock: 326667; Pricing: 1=0.13, 10=0.075, 50=0.0524, 100=0.0455, 500=0.0339, 1000=0.03036, 2500=0.02662, 5000=0.02438 (USD); Case/Package: 0201; Country of Origin: Japan, Mainland China, Malaysia, South Korea; Dielectric Material: Ceramic; Export Control Classification Number (ECCN) Code: EAR99; Height: 300µm; Harmonized Tariff Schedule (HTS) Code: 8532.24.00.20; Introduction Date: 2017-09-12; Length: 600µm; Lifecycle Status: Production; Material: Ceramic; Max Length: 690µm; Max Operating Temperature: 85°C; Max Thickness: 390µm; Max Width: 390µm; Min Length: 510µm; Min Operating Temperature: -55°C; Min Thickness: 210µm; Min Width: 210µm; Mounting Technology: Surface Mount; Number of Terminals: 2; REACH SVHC: Yes; Voltage Rating: 10V; Voltage Rating (DC): 10V; Width: 300µm; ComponentLink1URL: https://datasheet.octopart.com:443/LMK063BBJ474KPLF-Taiyo-Yuden-datasheet-182109438.pdf?src-supplier=IHS; ComponentLink1Description: https://datasheet.octopart.com:443/LMK063BBJ474KPLF-Taiyo-Yuden-datasheet-182109438.pdf?src-supplier=IHS; ComponentLink2URL: https://datasheet.octopart.com:443/LMK063BBJ474KPLF-Taiyo-Yuden-datasheet-140424376.pdf?src-supplier=Electro+Sonic; ComponentLink2Description: https://datasheet.octopart.com:443/LMK063BBJ474KPLF-Taiyo-Yuden-datasheet-140424376.pdf?src-supplier=Electro+Sonic; ComponentLink3URL: https://datasheet.octopart.com:443/LMK063BBJ474KPLF-Taiyo-Yuden-datasheet-138738940.pdf?src-supplier=Taiyo+Yuden+SCT; ComponentLink3Description: https://datasheet.octopart.com:443/LMK063BBJ474KPLF-Taiyo-Yuden-datasheet-138738940.pdf?src-supplier=Taiyo+Yuden+SCT; ComponentLink4URL: https://datasheet.octopart.com:443/LMK063BBJ474KPLF-Taiyo-Yuden-datasheet-99833418.pdf?src-supplier=Future+Electronics; ComponentLink4Description: https://datasheet.octopart.com:443/LMK063BBJ474KPLF-Taiyo-Yuden-datasheet-99833418.pdf?src-supplier=Future+Electronics; Supplier 1: DigiKey; Supplier Part Number 1: 587-6387-1-ND; Supplier 2: DigiKey; Supplier Part Number 2: 587-6387-2-ND; Supplier 3: Mouser; Supplier Part Number 3: 963-LMK063BBJ474KPLF
footprint CAPC0603X03N (Chip Capacitor, 2-Leads, Body 0.60x0.30mm, IPC Medium Density)
pins: 1, 2

## C680pF 25V 0201
designator C?, comment value 680pF  Voltage Rating (DC): 25V  (hidden comment: GRM0335C1E681JA01D)
25V 680pF C0G ±5% 0201 Multilayer Ceramic Capacitors MLCC - SMD/SMT ROHS; Manufacturer: Murata; Manufacturer Lifecycle Status: IN PRODUCTION; Temperature Coefficient: 30ppm/°C; Supplier: Avnet; Supplier Part Number: GRM0335C1E681JA01D; Manufacturer Part Number: GRM0335C1E681JA01D; RoHS: Compliant; Category: Ceramic Capacitors; Stock: 15000; Pricing: 15000=0,00196, 30000=0,00195, 60000=0,00194, 120000=0,00193, 240000=0,00192 (USD); Case/Package: 0201; Dielectric: C0G; Dielectric Material: Ceramic; Export Control Classification Number (ECCN) Code: EAR99; Height: 300µm; Harmonized Tariff Schedule (HTS) Code: 8532.24.00.20; Introduction Date: 2017-02-17; Length: 600µm; Lifecycle Status: Production; Material: Ceramic; Max Operating Temperature: 125°C; Min Operating Temperature: -55°C; Mounting Technology: Surface Mount; Number of Terminals: 2; REACH SVHC: Yes; Schedule B: 8532240020, 8532240020|8532240020, 8532240020|8532240020|8532240020, 8532240020|8532240020|8532240020|8532240020; Thickness: 300µm; Tolerance: 5%; Voltage Rating: 25V; Width: 300µm; ComponentLink1URL: https://datasheet.octopart.com:443/GRM0335C1E681JA01D-Murata-datasheet-165579666.pdf?src-supplier=TME; ComponentLink1Description: https://datasheet.octopart.com:443/GRM0335C1E681JA01D-Murata-datasheet-165579666.pdf?src-supplier=TME; ComponentLink2URL: https://datasheet.octopart.com:443/GRM0335C1E681JA01D-Murata-datasheet-141274003.pdf?src-supplier=Ciiva; ComponentLink2Description: https://datasheet.octopart.com:443/GRM0335C1E681JA01D-Murata-datasheet-141274003.pdf?src-supplier=Ciiva; ComponentLink3URL: https://datasheet.octopart.com:443/GRM0335C1E681JA01D-Murata-datasheet-140674114.pdf?src-supplier=Ciiva; ComponentLink3Description: https://datasheet.octopart.com:443/GRM0335C1E681JA01D-Murata-datasheet-140674114.pdf?src-supplier=Ciiva; ComponentLink4URL: https://datasheet.octopart.com:443/GRM0335C1E681JA01D-Murata-datasheet-138736897.pdf?src-supplier=Ciiva; ComponentLink4Description: https://datasheet.octopart.com:443/GRM0335C1E681JA01D-Murata-datasheet-138736897.pdf?src-supplier=Ciiva; ComponentLink5URL: https://datasheet.octopart.com:443/GRM0335C1E681JA01D-Murata-datasheet-32479577.pdf?src-supplier=HQonline; ComponentLink5Description: https://datasheet.octopart.com:443/GRM0335C1E681JA01D-Murata-datasheet-32479577.pdf?src-supplier=HQonline; ComponentLink6URL: https://datasheet.octopart.com/GRM0335C1E681JA01D-Murata-datasheet-12515295.pdf; ComponentLink6Description: https://datasheet.octopart.com/GRM0335C1E681JA01D-Murata-datasheet-12515295.pdf; ComponentLink7URL: https://datasheet.octopart.com/GRM0335C1E681JA01D-Murata-datasheet-12510076.pdf; ComponentLink7Description: https://datasheet.octopart.com/GRM0335C1E681JA01D-Murata-datasheet-12510076.pdf; ComponentLink8URL: https://datasheet.octopart.com/GRM0335C1E681JA01D-Murata-datasheet-11978611.pdf; ComponentLink8Description: https://datasheet.octopart.com/GRM0335C1E681JA01D-Murata-datasheet-11978611.pdf; ComponentLink9URL: https://datasheet.octopart.com/GRM0335C1E681JA01D-Murata-datasheet-10025737.pdf; ComponentLink9Description: https://datasheet.octopart.com/GRM0335C1E681JA01D-Murata-datasheet-10025737.pdf; ComponentLink10URL: https://datasheet.octopart.com/GRM0335C1E681JA01D-Murata-datasheet-8819587.pdf; ComponentLink10Description: https://datasheet.octopart.com/GRM0335C1E681JA01D-Murata-datasheet-8819587.pdf; ComponentLink11URL: http://sigma.octopart.com:80/reach_statement/Murata-company-16.pdf?src-supplier=Compliance+Statements; ComponentLink11Description: http://sigma.octopart.com:80/reach_statement/Murata-company-16.pdf?src-supplier=Compliance+Statements; Supplier 1: DigiKey; Supplier Part Number 1: 490-14330-1-ND; Supplier 2: DigiKey; Supplier Part Number 2: 490-14330-6-ND; Supplier 3: Mouser; Supplier Part Number 3: 81-GRM0335C1E681JA1D
footprint CAPC0603X03N (Chip Capacitor, 2-Leads, Body 0.60x0.30mm, IPC Medium Density)
pins: 1, 2

## CDZVT2R3.6B
designator D?  value 3V6  (hidden comment: CDZVT2R3.6B)
Zener Diode 3.6 V 100 mW Surface Mount VMN2M (SOD-923); Manufacturer Name 1: Rohm; Datasheet Link: https://fscdn.rohm.com/en/products/databook/datasheet/discrete/diode/zener/cdzvt2r3.6b-e.pdf; Manufacturer Part Number 1: CDZVT2R3.6B; Supplier 1: DigiKey; Supplier Link 1: https://www.digikey.com/en/products/detail/rohm-semiconductor/CDZVT2R3-6B/5955687; Supplier Part Number 1: CDZVT2R3.6BTR-ND; Supplier Unit Price 1: 0.042
footprint SODFL1006X40N
pins: 1 K, 2 A

## CH343P
designator U?
CH343P USB to UART converter; Manufacturer: WCH; Manufacturer Part Number: CH343P
footprint QFN50P300X300X80-17N
pins: 1 VIO, 2 GND, 3 VDD5V, 4 TXD, 5 RXD, 6 V3, 7 DP, 8 DN, 9 VBUS, 10 ~{ACT}, 11 DCD, 12 DTR, 13 RTS, 14 DSR, 15 CTS, 16 RI, 17 GND

## CON 1X4P F THT
designator J?, comment PPTC041LFBN-RC
4 Position Header Connector 0.100 (2.54mm) Through Hole Tin; MF: Sullins Connector; SnapEDA_Link: https://www.snapeda.com/parts/PPTC041LFBN-RC/Sullins/view-part/?ref=snap; Package: None; Value: *; MP: PPTC041LFBN-RC; Check_prices: https://www.snapeda.com/parts/PPTC041LFBN-RC/Sullins/view-part/?ref=eda
footprint SULLINS_PPTC041LFBN-RC
pins: 1, 2, 3, 4